# Altium schematic symbol library SolderPoint25.SchLib: 1 symbol
Pins are listed as number, name and electrical type; pins without a type are passive.

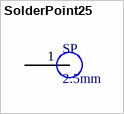
[diagram p0: symbol SolderPoint25]

## SolderPoint25
designator SP, comment 2.5mm
footprint PCBComponent_1
pins: 1